# Altium footprint library Package_DFN_QFN.PcbLib: 735 footprints (part 31 of 46)
Each footprint in its own frame and in the unit in brackets; x right, y up, seen from the top. Pads: shape width x height; smd on the part's side, far side on the other; paste and mask are expansions set on the pad; w line width, h text height; cw(c..) or ccw(c..) is an arc to the next point about the centre after c.
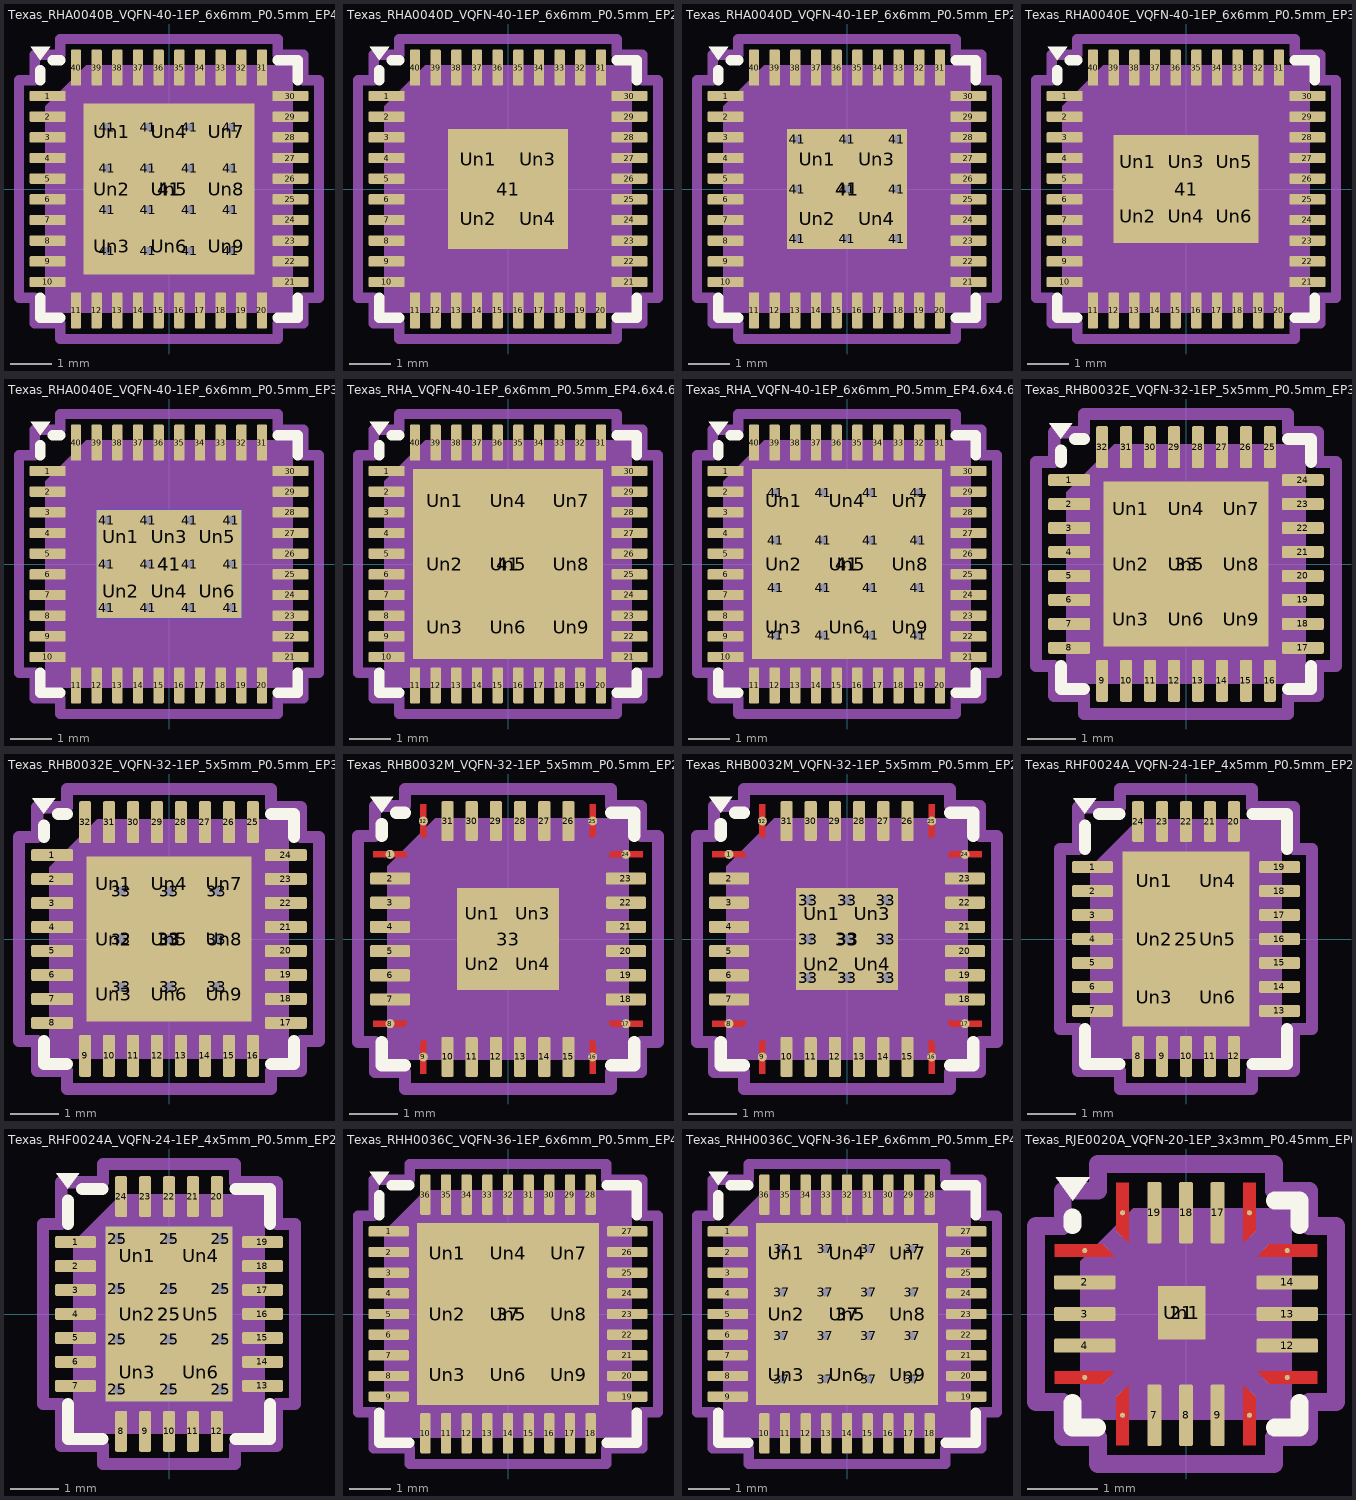
[diagram p30: the footprints below, top view; thin cyan lines are the x and y axes]

## Texas_RHA0040B_VQFN-40-1EP_6x6mm_P0.5mm_EP4.15x4.15mm_ThermalVias [mm] "Texas_RHA0040B_VQFN-40-1EP_6x6mm_P0.5mm_EP4.15x4.15mm_ThermalVias"
pads (67):
  rrect25% 0.875x0.25 smd: 1(-2.937,2.25) 2(-2.937,1.75) 3(-2.937,1.25) 4(-2.937,0.75) 5(-2.937,0.25) 6(-2.937,-0.25) 7(-2.937,-0.75) 8(-2.937,-1.25) 9(-2.937,-1.75) 10(-2.937,-2.25) 21(2.937,-2.25) 22(2.937,-1.75) 23(2.937,-1.25) 24(2.937,-0.75) 25(2.937,-0.25) 26(2.937,0.25) 27(2.937,0.75) 28(2.937,1.25) 29(2.937,1.75) 30(2.937,2.25)
  rrect25% 0.25x0.875 smd: 11(-2.25,-2.937) 12(-1.75,-2.937) 13(-1.25,-2.937) 14(-0.75,-2.937) 15(-0.25,-2.937) 16(0.25,-2.937) 17(0.75,-2.937) 18(1.25,-2.937) 19(1.75,-2.937) 20(2.25,-2.937) 31(2.25,2.937) 32(1.75,2.937) 33(1.25,2.937) 34(0.75,2.937) 35(0.25,2.937) 36(-0.25,2.937) 37(-0.75,2.937) 38(-1.25,2.937) 39(-1.75,2.937) 40(-2.25,2.937)
  round 0.5 hole 0.2: 41(-1.5,-1.5) 41(-1.5,-0.5) 41(-1.5,0.5) 41(-1.5,1.5) 41(-0.5,-1.5) 41(-0.5,-0.5) 41(-0.5,0.5) 41(-0.5,1.5) 41(0.5,-1.5) 41(0.5,-0.5) 41(0.5,0.5) 41(0.5,1.5) 41(1.5,-1.5) 41(1.5,-0.5) 41(1.5,0.5) 41(1.5,1.5)
  rect 4.15x4.15 smd: 41(0,0)
  rect 3.5x3.5 smd far side: 41(0,0)
  rrect22% 1.12x1.12 on Top Paste: Un1(-1.38,1.38) Un2(-1.38,0) Un3(-1.38,-1.38) Un4(0,1.38) Un5(0,0) Un6(0,-1.38) Un7(1.38,1.38) Un8(1.38,0) Un9(1.38,-1.38)
F.SilkS:
  region: -3.11,3.11 -3.35,3.44 -2.87,3.44
  lines w0.254: -3.11,-2.635 -3.11,-3.11 -2.635,-3.11 ; -3.11,2.635 -3.11,2.87 ; -2.81,3.11 -2.635,3.11 ; 2.635,-3.11 3.11,-3.11 3.11,-2.635 ; 2.635,3.11 3.11,3.11 3.11,2.635
Top Component Center:
  lines w0.127: -0.127,0 0.127,0 -0.127,0 ; 0,-0.127 0,0.127 0,-0.127
Top Assembly:
  region: 3,-3 -3,-3 -3,2 -2,3 3,3
Top Courtyard:
  lines w0.254: -3.63,-2.63 -3.25,-2.63 -3.25,-3.25 -2.63,-3.25 -2.63,-3.63 2.63,-3.63 2.63,-3.25 3.25,-3.25 3.25,-2.63 3.63,-2.63 3.63,2.63 3.25,2.63 3.25,3.25 2.63,3.25 2.63,3.63 -2.63,3.63 -2.63,3.25 -3.25,3.25 -3.25,2.63 -3.63,2.63 -3.63,-2.63
Top Designator:
  text ".Designator" at -3.43,-0.344 h1.52

## Texas_RHA0040D_VQFN-40-1EP_6x6mm_P0.5mm_EP2.9x2.9mm [mm] "Texas_RHA0040D_VQFN-40-1EP_6x6mm_P0.5mm_EP2.9x2.9mm"
pads (45):
  rrect25% 0.875x0.25 smd: 1(-2.937,2.25) 2(-2.937,1.75) 3(-2.937,1.25) 4(-2.937,0.75) 5(-2.937,0.25) 6(-2.937,-0.25) 7(-2.937,-0.75) 8(-2.937,-1.25) 9(-2.937,-1.75) 10(-2.937,-2.25) 21(2.937,-2.25) 22(2.937,-1.75) 23(2.937,-1.25) 24(2.937,-0.75) 25(2.937,-0.25) 26(2.937,0.25) 27(2.937,0.75) 28(2.937,1.25) 29(2.937,1.75) 30(2.937,2.25)
  rrect25% 0.25x0.875 smd: 11(-2.25,-2.937) 12(-1.75,-2.937) 13(-1.25,-2.937) 14(-0.75,-2.937) 15(-0.25,-2.937) 16(0.25,-2.937) 17(0.75,-2.937) 18(1.25,-2.937) 19(1.75,-2.937) 20(2.25,-2.937) 31(2.25,2.937) 32(1.75,2.937) 33(1.25,2.937) 34(0.75,2.937) 35(0.25,2.937) 36(-0.25,2.937) 37(-0.75,2.937) 38(-1.25,2.937) 39(-1.75,2.937) 40(-2.25,2.937)
  rect 2.9x2.9 smd: 41(0,0)
  rrect21% 1.17x1.17 on Top Paste: Un1(-0.725,0.725) Un2(-0.725,-0.725) Un3(0.725,0.725) Un4(0.725,-0.725)
F.SilkS:
  region: -3.11,3.11 -3.35,3.44 -2.87,3.44
  lines w0.254: -3.11,-2.635 -3.11,-3.11 -2.635,-3.11 ; -3.11,2.635 -3.11,2.87 ; -2.81,3.11 -2.635,3.11 ; 2.635,-3.11 3.11,-3.11 3.11,-2.635 ; 2.635,3.11 3.11,3.11 3.11,2.635
Top Component Center:
  lines w0.127: -0.127,0 0.127,0 -0.127,0 ; 0,-0.127 0,0.127 0,-0.127
Top Assembly:
  region: 3,-3 -3,-3 -3,2 -2,3 3,3
Top Courtyard:
  lines w0.254: -3.63,-2.63 -3.25,-2.63 -3.25,-3.25 -2.63,-3.25 -2.63,-3.63 2.63,-3.63 2.63,-3.25 3.25,-3.25 3.25,-2.63 3.63,-2.63 3.63,2.63 3.25,2.63 3.25,3.25 2.63,3.25 2.63,3.63 -2.63,3.63 -2.63,3.25 -3.25,3.25 -3.25,2.63 -3.63,2.63 -3.63,-2.63
Top Designator:
  text ".Designator" at -3.43,-0.344 h1.52

## Texas_RHA0040D_VQFN-40-1EP_6x6mm_P0.5mm_EP2.9x2.9mm_ThermalVias [mm] "Texas_RHA0040D_VQFN-40-1EP_6x6mm_P0.5mm_EP2.9x2.9mm_ThermalVias"
pads (55):
  rrect25% 0.875x0.25 smd: 1(-2.937,2.25) 2(-2.937,1.75) 3(-2.937,1.25) 4(-2.937,0.75) 5(-2.937,0.25) 6(-2.937,-0.25) 7(-2.937,-0.75) 8(-2.937,-1.25) 9(-2.937,-1.75) 10(-2.937,-2.25) 21(2.937,-2.25) 22(2.937,-1.75) 23(2.937,-1.25) 24(2.937,-0.75) 25(2.937,-0.25) 26(2.937,0.25) 27(2.937,0.75) 28(2.937,1.25) 29(2.937,1.75) 30(2.937,2.25)
  rrect25% 0.25x0.875 smd: 11(-2.25,-2.937) 12(-1.75,-2.937) 13(-1.25,-2.937) 14(-0.75,-2.937) 15(-0.25,-2.937) 16(0.25,-2.937) 17(0.75,-2.937) 18(1.25,-2.937) 19(1.75,-2.937) 20(2.25,-2.937) 31(2.25,2.937) 32(1.75,2.937) 33(1.25,2.937) 34(0.75,2.937) 35(0.25,2.937) 36(-0.25,2.937) 37(-0.75,2.937) 38(-1.25,2.937) 39(-1.75,2.937) 40(-2.25,2.937)
  round 0.5 hole 0.2: 41(-1.2,-1.2) 41(-1.2,0) 41(-1.2,1.2) 41(0,-1.2) 41(0,0) 41(0,1.2) 41(1.2,-1.2) 41(1.2,0) 41(1.2,1.2)
  rect 2.9x2.9 smd: 41(0,0)
  rect 2.9x2.9 smd far side: 41(0,0)
  rrect21% 1.21x1.21 on Top Paste: Un1(-0.725,0.725) Un2(-0.725,-0.725) Un3(0.725,0.725) Un4(0.725,-0.725)
F.SilkS:
  region: -3.11,3.11 -3.35,3.44 -2.87,3.44
  lines w0.254: -3.11,-2.635 -3.11,-3.11 -2.635,-3.11 ; -3.11,2.635 -3.11,2.87 ; -2.81,3.11 -2.635,3.11 ; 2.635,-3.11 3.11,-3.11 3.11,-2.635 ; 2.635,3.11 3.11,3.11 3.11,2.635
Top Component Center:
  lines w0.127: -0.127,0 0.127,0 -0.127,0 ; 0,-0.127 0,0.127 0,-0.127
Top Assembly:
  region: 3,-3 -3,-3 -3,2 -2,3 3,3
Top Courtyard:
  lines w0.254: -3.63,-2.63 -3.25,-2.63 -3.25,-3.25 -2.63,-3.25 -2.63,-3.63 2.63,-3.63 2.63,-3.25 3.25,-3.25 3.25,-2.63 3.63,-2.63 3.63,2.63 3.25,2.63 3.25,3.25 2.63,3.25 2.63,3.63 -2.63,3.63 -2.63,3.25 -3.25,3.25 -3.25,2.63 -3.63,2.63 -3.63,-2.63
Top Designator:
  text ".Designator" at -3.43,-0.344 h1.52

## Texas_RHA0040E_VQFN-40-1EP_6x6mm_P0.5mm_EP3.52x2.62mm [mm] "Texas_RHA0040E_VQFN-40-1EP_6x6mm_P0.5mm_EP3.52x2.62mm"
pads (47):
  rrect25% 0.875x0.25 smd: 1(-2.937,2.25) 2(-2.937,1.75) 3(-2.937,1.25) 4(-2.937,0.75) 5(-2.937,0.25) 6(-2.937,-0.25) 7(-2.937,-0.75) 8(-2.937,-1.25) 9(-2.937,-1.75) 10(-2.937,-2.25) 21(2.937,-2.25) 22(2.937,-1.75) 23(2.937,-1.25) 24(2.937,-0.75) 25(2.937,-0.25) 26(2.937,0.25) 27(2.937,0.75) 28(2.937,1.25) 29(2.937,1.75) 30(2.937,2.25)
  rrect25% 0.25x0.875 smd: 11(-2.25,-2.937) 12(-1.75,-2.937) 13(-1.25,-2.937) 14(-0.75,-2.937) 15(-0.25,-2.937) 16(0.25,-2.937) 17(0.75,-2.937) 18(1.25,-2.937) 19(1.75,-2.937) 20(2.25,-2.937) 31(2.25,2.937) 32(1.75,2.937) 33(1.25,2.937) 34(0.75,2.937) 35(0.25,2.937) 36(-0.25,2.937) 37(-0.75,2.937) 38(-1.25,2.937) 39(-1.75,2.937) 40(-2.25,2.937)
  rect 3.52x2.62 smd: 41(0,0)
  rrect25% 0.95x1.06 on Top Paste: Un1(-1.17,0.655) Un2(-1.17,-0.655) Un3(0,0.655) Un4(0,-0.655) Un5(1.17,0.655) Un6(1.17,-0.655)
F.SilkS:
  region: -3.11,3.11 -3.35,3.44 -2.87,3.44
  lines w0.254: -3.11,-2.635 -3.11,-3.11 -2.635,-3.11 ; -3.11,2.635 -3.11,2.87 ; -2.81,3.11 -2.635,3.11 ; 2.635,-3.11 3.11,-3.11 3.11,-2.635 ; 2.635,3.11 3.11,3.11 3.11,2.635
Top Component Center:
  lines w0.127: -0.127,0 0.127,0 -0.127,0 ; 0,-0.127 0,0.127 0,-0.127
Top Assembly:
  region: 3,-3 -3,-3 -3,2 -2,3 3,3
Top Courtyard:
  lines w0.254: -3.63,-2.63 -3.25,-2.63 -3.25,-3.25 -2.63,-3.25 -2.63,-3.63 2.63,-3.63 2.63,-3.25 3.25,-3.25 3.25,-2.63 3.63,-2.63 3.63,2.63 3.25,2.63 3.25,3.25 2.63,3.25 2.63,3.63 -2.63,3.63 -2.63,3.25 -3.25,3.25 -3.25,2.63 -3.63,2.63 -3.63,-2.63
Top Designator:
  text ".Designator" at -3.43,-0.344 h1.52

## Texas_RHA0040E_VQFN-40-1EP_6x6mm_P0.5mm_EP3.52x2.62mm_ThermalVias [mm] "Texas_RHA0040E_VQFN-40-1EP_6x6mm_P0.5mm_EP3.52x2.62mm_ThermalVias"
pads (60):
  rrect25% 0.875x0.25 smd: 1(-2.937,2.25) 2(-2.937,1.75) 3(-2.937,1.25) 4(-2.937,0.75) 5(-2.937,0.25) 6(-2.937,-0.25) 7(-2.937,-0.75) 8(-2.937,-1.25) 9(-2.937,-1.75) 10(-2.937,-2.25) 21(2.937,-2.25) 22(2.937,-1.75) 23(2.937,-1.25) 24(2.937,-0.75) 25(2.937,-0.25) 26(2.937,0.25) 27(2.937,0.75) 28(2.937,1.25) 29(2.937,1.75) 30(2.937,2.25)
  rrect25% 0.25x0.875 smd: 11(-2.25,-2.937) 12(-1.75,-2.937) 13(-1.25,-2.937) 14(-0.75,-2.937) 15(-0.25,-2.937) 16(0.25,-2.937) 17(0.75,-2.937) 18(1.25,-2.937) 19(1.75,-2.937) 20(2.25,-2.937) 31(2.25,2.937) 32(1.75,2.937) 33(1.25,2.937) 34(0.75,2.937) 35(0.25,2.937) 36(-0.25,2.937) 37(-0.75,2.937) 38(-1.25,2.937) 39(-1.75,2.937) 40(-2.25,2.937)
  round 0.5 hole 0.2: 41(-1.51,-1.06) 41(-1.51,0) 41(-1.51,1.06) 41(-0.503,-1.06) 41(-0.503,0) 41(-0.503,1.06) 41(0.503,-1.06) 41(0.503,0) 41(0.503,1.06) 41(1.51,-1.06) 41(1.51,0) 41(1.51,1.06)
  rect 3.52x2.62 smd: 41(0,0)
  rect 3.52x2.62 smd far side: 41(0,0)
  rrect25% 0.98x1.1 on Top Paste: Un1(-1.17,0.655) Un2(-1.17,-0.655) Un3(0,0.655) Un4(0,-0.655) Un5(1.17,0.655) Un6(1.17,-0.655)
F.SilkS:
  region: -3.11,3.11 -3.35,3.44 -2.87,3.44
  lines w0.254: -3.11,-2.635 -3.11,-3.11 -2.635,-3.11 ; -3.11,2.635 -3.11,2.87 ; -2.81,3.11 -2.635,3.11 ; 2.635,-3.11 3.11,-3.11 3.11,-2.635 ; 2.635,3.11 3.11,3.11 3.11,2.635
Top Component Center:
  lines w0.127: -0.127,0 0.127,0 -0.127,0 ; 0,-0.127 0,0.127 0,-0.127
Top Assembly:
  region: 3,-3 -3,-3 -3,2 -2,3 3,3
Top Courtyard:
  lines w0.254: -3.63,-2.63 -3.25,-2.63 -3.25,-3.25 -2.63,-3.25 -2.63,-3.63 2.63,-3.63 2.63,-3.25 3.25,-3.25 3.25,-2.63 3.63,-2.63 3.63,2.63 3.25,2.63 3.25,3.25 2.63,3.25 2.63,3.63 -2.63,3.63 -2.63,3.25 -3.25,3.25 -3.25,2.63 -3.63,2.63 -3.63,-2.63
Top Designator:
  text ".Designator" at -3.43,-0.344 h1.52

## Texas_RHA_VQFN-40-1EP_6x6mm_P0.5mm_EP4.6x4.6mm [mm] "Texas_RHA_VQFN-40-1EP_6x6mm_P0.5mm_EP4.6x4.6mm"
pads (50):
  rrect25% 0.875x0.25 smd: 1(-2.937,2.25) 2(-2.937,1.75) 3(-2.937,1.25) 4(-2.937,0.75) 5(-2.937,0.25) 6(-2.937,-0.25) 7(-2.937,-0.75) 8(-2.937,-1.25) 9(-2.937,-1.75) 10(-2.937,-2.25) 21(2.937,-2.25) 22(2.937,-1.75) 23(2.937,-1.25) 24(2.937,-0.75) 25(2.937,-0.25) 26(2.937,0.25) 27(2.937,0.75) 28(2.937,1.25) 29(2.937,1.75) 30(2.937,2.25)
  rrect25% 0.25x0.875 smd: 11(-2.25,-2.937) 12(-1.75,-2.937) 13(-1.25,-2.937) 14(-0.75,-2.937) 15(-0.25,-2.937) 16(0.25,-2.937) 17(0.75,-2.937) 18(1.25,-2.937) 19(1.75,-2.937) 20(2.25,-2.937) 31(2.25,2.937) 32(1.75,2.937) 33(1.25,2.937) 34(0.75,2.937) 35(0.25,2.937) 36(-0.25,2.937) 37(-0.75,2.937) 38(-1.25,2.937) 39(-1.75,2.937) 40(-2.25,2.937)
  rect 4.6x4.6 smd: 41(0,0)
  rrect20% 1.24x1.24 on Top Paste: Un1(-1.53,1.53) Un2(-1.53,0) Un3(-1.53,-1.53) Un4(0,1.53) Un5(0,0) Un6(0,-1.53) Un7(1.53,1.53) Un8(1.53,0) Un9(1.53,-1.53)
F.SilkS:
  region: -3.11,3.11 -3.35,3.44 -2.87,3.44
  lines w0.254: -3.11,-2.635 -3.11,-3.11 -2.635,-3.11 ; -3.11,2.635 -3.11,2.87 ; -2.81,3.11 -2.635,3.11 ; 2.635,-3.11 3.11,-3.11 3.11,-2.635 ; 2.635,3.11 3.11,3.11 3.11,2.635
Top Component Center:
  lines w0.127: -0.127,0 0.127,0 -0.127,0 ; 0,-0.127 0,0.127 0,-0.127
Top Assembly:
  region: 3,-3 -3,-3 -3,2 -2,3 3,3
Top Courtyard:
  lines w0.254: -3.63,-2.63 -3.25,-2.63 -3.25,-3.25 -2.63,-3.25 -2.63,-3.63 2.63,-3.63 2.63,-3.25 3.25,-3.25 3.25,-2.63 3.63,-2.63 3.63,2.63 3.25,2.63 3.25,3.25 2.63,3.25 2.63,3.63 -2.63,3.63 -2.63,3.25 -3.25,3.25 -3.25,2.63 -3.63,2.63 -3.63,-2.63
Top Designator:
  text ".Designator" at -3.43,-0.344 h1.52

## Texas_RHA_VQFN-40-1EP_6x6mm_P0.5mm_EP4.6x4.6mm_ThermalVias [mm] "Texas_RHA_VQFN-40-1EP_6x6mm_P0.5mm_EP4.6x4.6mm_ThermalVias"
pads (67):
  rrect25% 0.875x0.25 smd: 1(-2.937,2.25) 2(-2.937,1.75) 3(-2.937,1.25) 4(-2.937,0.75) 5(-2.937,0.25) 6(-2.937,-0.25) 7(-2.937,-0.75) 8(-2.937,-1.25) 9(-2.937,-1.75) 10(-2.937,-2.25) 21(2.937,-2.25) 22(2.937,-1.75) 23(2.937,-1.25) 24(2.937,-0.75) 25(2.937,-0.25) 26(2.937,0.25) 27(2.937,0.75) 28(2.937,1.25) 29(2.937,1.75) 30(2.937,2.25)
  rrect25% 0.25x0.875 smd: 11(-2.25,-2.937) 12(-1.75,-2.937) 13(-1.25,-2.937) 14(-0.75,-2.937) 15(-0.25,-2.937) 16(0.25,-2.937) 17(0.75,-2.937) 18(1.25,-2.937) 19(1.75,-2.937) 20(2.25,-2.937) 31(2.25,2.937) 32(1.75,2.937) 33(1.25,2.937) 34(0.75,2.937) 35(0.25,2.937) 36(-0.25,2.937) 37(-0.75,2.937) 38(-1.25,2.937) 39(-1.75,2.937) 40(-2.25,2.937)
  round 0.5 hole 0.2: 41(-1.725,-1.725) 41(-1.725,-0.575) 41(-1.725,0.575) 41(-1.725,1.725) 41(-0.575,-1.725) 41(-0.575,-0.575) 41(-0.575,0.575) 41(-0.575,1.725) 41(0.575,-1.725) 41(0.575,-0.575) 41(0.575,0.575) 41(0.575,1.725) 41(1.725,-1.725) 41(1.725,-0.575) 41(1.725,0.575) 41(1.725,1.725)
  rect 4.6x4.6 smd: 41(0,0)
  rect 3.95x3.95 smd far side: 41(0,0)
  rrect20% 1.24x1.24 on Top Paste: Un1(-1.53,1.53) Un2(-1.53,0) Un3(-1.53,-1.53) Un4(0,1.53) Un5(0,0) Un6(0,-1.53) Un7(1.53,1.53) Un8(1.53,0) Un9(1.53,-1.53)
F.SilkS:
  region: -3.11,3.11 -3.35,3.44 -2.87,3.44
  lines w0.254: -3.11,-2.635 -3.11,-3.11 -2.635,-3.11 ; -3.11,2.635 -3.11,2.87 ; -2.81,3.11 -2.635,3.11 ; 2.635,-3.11 3.11,-3.11 3.11,-2.635 ; 2.635,3.11 3.11,3.11 3.11,2.635
Top Component Center:
  lines w0.127: -0.127,0 0.127,0 -0.127,0 ; 0,-0.127 0,0.127 0,-0.127
Top Assembly:
  region: 3,-3 -3,-3 -3,2 -2,3 3,3
Top Courtyard:
  lines w0.254: -3.63,-2.63 -3.25,-2.63 -3.25,-3.25 -2.63,-3.25 -2.63,-3.63 2.63,-3.63 2.63,-3.25 3.25,-3.25 3.25,-2.63 3.63,-2.63 3.63,2.63 3.25,2.63 3.25,3.25 2.63,3.25 2.63,3.63 -2.63,3.63 -2.63,3.25 -3.25,3.25 -3.25,2.63 -3.63,2.63 -3.63,-2.63
Top Designator:
  text ".Designator" at -3.43,-0.344 h1.52

## Texas_RHB0032E_VQFN-32-1EP_5x5mm_P0.5mm_EP3.45x3.45mm [mm] "Texas_RHB0032E_VQFN-32-1EP_5x5mm_P0.5mm_EP3.45x3.45mm"
pads (42):
  rrect25% 0.875x0.25 smd: 1(-2.438,1.75) 2(-2.438,1.25) 3(-2.438,0.75) 4(-2.438,0.25) 5(-2.438,-0.25) 6(-2.438,-0.75) 7(-2.438,-1.25) 8(-2.438,-1.75) 17(2.438,-1.75) 18(2.438,-1.25) 19(2.438,-0.75) 20(2.438,-0.25) 21(2.438,0.25) 22(2.438,0.75) 23(2.438,1.25) 24(2.438,1.75)
  rrect25% 0.25x0.875 smd: 9(-1.75,-2.438) 10(-1.25,-2.438) 11(-0.75,-2.438) 12(-0.25,-2.438) 13(0.25,-2.438) 14(0.75,-2.438) 15(1.25,-2.438) 16(1.75,-2.438) 25(1.75,2.438) 26(1.25,2.438) 27(0.75,2.438) 28(0.25,2.438) 29(-0.25,2.438) 30(-0.75,2.438) 31(-1.25,2.438) 32(-1.75,2.438)
  rect 3.45x3.45 smd: 33(0,0)
  rrect25% 0.93x0.93 on Top Paste: Un1(-1.15,1.15) Un2(-1.15,0) Un3(-1.15,-1.15) Un4(0,1.15) Un5(0,0) Un6(0,-1.15) Un7(1.15,1.15) Un8(1.15,0) Un9(1.15,-1.15)
F.SilkS:
  region: -2.61,2.61 -2.85,2.94 -2.37,2.94
  lines w0.254: -2.61,-2.135 -2.61,-2.61 -2.135,-2.61 ; -2.61,2.135 -2.61,2.37 ; -2.31,2.61 -2.135,2.61 ; 2.135,-2.61 2.61,-2.61 2.61,-2.135 ; 2.135,2.61 2.61,2.61 2.61,2.135
Top Component Center:
  lines w0.127: -0.127,0 0.127,0 -0.127,0 ; 0,-0.127 0,0.127 0,-0.127
Top Assembly:
  region: 2.5,-2.5 -2.5,-2.5 -2.5,1.5 -1.5,2.5 2.5,2.5
Top Courtyard:
  lines w0.254: -3.13,-2.13 -3.13,2.13 -2.75,2.13 -2.75,2.75 -2.13,2.75 -2.13,3.13 2.13,3.13 2.13,2.75 2.75,2.75 2.75,2.13 3.13,2.13 3.13,-2.13 2.75,-2.13 2.75,-2.75 2.13,-2.75 2.13,-3.13 -2.13,-3.13 -2.13,-2.75 -2.75,-2.75 -2.75,-2.13 -3.13,-2.13
Top Designator:
  text ".Designator" at -3.43,-0.344 h1.52
3D body "Texas_RHB0032E_VQFN-32-1EP_5x5mm_P0.5mm_EP3.45x3.45mm.step": height 0.8, standoff 0, extent -2.5,-2.5 2.5,2.5

## Texas_RHB0032E_VQFN-32-1EP_5x5mm_P0.5mm_EP3.45x3.45mm_ThermalVias [mm] "Texas_RHB0032E_VQFN-32-1EP_5x5mm_P0.5mm_EP3.45x3.45mm_ThermalVias"
pads (52):
  rrect25% 0.875x0.25 smd: 1(-2.438,1.75) 2(-2.438,1.25) 3(-2.438,0.75) 4(-2.438,0.25) 5(-2.438,-0.25) 6(-2.438,-0.75) 7(-2.438,-1.25) 8(-2.438,-1.75) 17(2.438,-1.75) 18(2.438,-1.25) 19(2.438,-0.75) 20(2.438,-0.25) 21(2.438,0.25) 22(2.438,0.75) 23(2.438,1.25) 24(2.438,1.75)
  rrect25% 0.25x0.875 smd: 9(-1.75,-2.438) 10(-1.25,-2.438) 11(-0.75,-2.438) 12(-0.25,-2.438) 13(0.25,-2.438) 14(0.75,-2.438) 15(1.25,-2.438) 16(1.75,-2.438) 25(1.75,2.438) 26(1.25,2.438) 27(0.75,2.438) 28(0.25,2.438) 29(-0.25,2.438) 30(-0.75,2.438) 31(-1.25,2.438) 32(-1.75,2.438)
  round 0.5 hole 0.2: 33(-1,-1) 33(-1,0) 33(-1,1) 33(0,-1) 33(0,0) 33(0,1) 33(1,-1) 33(1,0) 33(1,1)
  rect 3.45x3.45 smd: 33(0,0)
  rect 2.5x2.5 smd far side: 33(0,0)
  rrect25% 0.93x0.93 on Top Paste: Un1(-1.15,1.15) Un2(-1.15,0) Un3(-1.15,-1.15) Un4(0,1.15) Un5(0,0) Un6(0,-1.15) Un7(1.15,1.15) Un8(1.15,0) Un9(1.15,-1.15)
F.SilkS:
  region: -2.61,2.61 -2.85,2.94 -2.37,2.94
  lines w0.254: -2.61,-2.135 -2.61,-2.61 -2.135,-2.61 ; -2.61,2.135 -2.61,2.37 ; -2.31,2.61 -2.135,2.61 ; 2.135,-2.61 2.61,-2.61 2.61,-2.135 ; 2.135,2.61 2.61,2.61 2.61,2.135
Top Component Center:
  lines w0.127: -0.127,0 0.127,0 -0.127,0 ; 0,-0.127 0,0.127 0,-0.127
Top Assembly:
  region: 2.5,-2.5 -2.5,-2.5 -2.5,1.5 -1.5,2.5 2.5,2.5
Top Courtyard:
  lines w0.254: -3.13,-2.13 -3.13,2.13 -2.75,2.13 -2.75,2.75 -2.13,2.75 -2.13,3.13 2.13,3.13 2.13,2.75 2.75,2.75 2.75,2.13 3.13,2.13 3.13,-2.13 2.75,-2.13 2.75,-2.75 2.13,-2.75 2.13,-3.13 -2.13,-3.13 -2.13,-2.75 -2.75,-2.75 -2.75,-2.13 -3.13,-2.13
Top Designator:
  text ".Designator" at -3.43,-0.344 h1.52
3D body "Texas_RHB0032E_VQFN-32-1EP_5x5mm_P0.5mm_EP3.45x3.45mm.step": height 0.8, standoff 0, extent -2.5,-2.5 2.5,2.5

## Texas_RHB0032M_VQFN-32-1EP_5x5mm_P0.5mm_EP2.1x2.1mm [mm] "Texas_RHB0032M_VQFN-32-1EP_5x5mm_P0.5mm_EP2.1x2.1mm"
pads (37):
  round 0.186 smd: 1(-2.438,1.75) 8(-2.438,-1.75) 9(-1.75,-2.438) 16(1.75,-2.438) 17(2.438,-1.75) 24(2.438,1.75) 25(1.75,2.438) 32(-1.75,2.438)
  rrect25% 0.825x0.25 smd: 2(-2.438,1.25) 3(-2.438,0.75) 4(-2.438,0.25) 5(-2.438,-0.25) 6(-2.438,-0.75) 7(-2.438,-1.25) 18(2.438,-1.25) 19(2.438,-0.75) 20(2.438,-0.25) 21(2.438,0.25) 22(2.438,0.75) 23(2.438,1.25)
  rrect25% 0.25x0.825 smd: 10(-1.25,-2.438) 11(-0.75,-2.438) 12(-0.25,-2.438) 13(0.25,-2.438) 14(0.75,-2.438) 15(1.25,-2.438) 26(1.25,2.438) 27(0.75,2.438) 28(0.25,2.438) 29(-0.25,2.438) 30(-0.75,2.438) 31(-1.25,2.438)
  rect 2.1x2.1 smd: 33(0,0)
  rrect25% 0.85x0.85 on Top Paste: Un1(-0.525,0.525) Un2(-0.525,-0.525) Un3(0.525,0.525) Un4(0.525,-0.525)
F.Cu:
  region: -2.088,1.759 -2.088,1.687 -2.788,1.687 -2.788,1.812 -2.141,1.812
  region: -2.088,-1.759 -2.141,-1.812 -2.788,-1.812 -2.788,-1.687 -2.088,-1.687
  region: -1.687,-2.788 -1.812,-2.788 -1.812,-2.141 -1.759,-2.088 -1.687,-2.088
  region: 1.812,-2.141 1.812,-2.788 1.687,-2.788 1.687,-2.088 1.759,-2.088
  region: 2.788,-1.812 2.141,-1.812 2.088,-1.759 2.088,-1.687 2.788,-1.687
  region: 2.788,1.687 2.088,1.687 2.088,1.759 2.141,1.812 2.788,1.812
  region: 1.812,2.141 1.759,2.088 1.687,2.088 1.687,2.788 1.812,2.788
  region: -1.687,2.088 -1.759,2.088 -1.812,2.141 -1.812,2.788 -1.687,2.788
F.SilkS:
  region: -2.61,2.61 -2.85,2.94 -2.37,2.94
  lines w0.254: -2.61,-2.135 -2.61,-2.61 -2.135,-2.61 ; -2.61,2.135 -2.61,2.37 ; -2.31,2.61 -2.135,2.61 ; 2.135,-2.61 2.61,-2.61 2.61,-2.135 ; 2.135,2.61 2.61,2.61 2.61,2.135
F.Paste:
  region: -2.088,1.759 -2.088,1.687 -2.788,1.687 -2.788,1.812 -2.141,1.812
  region: -2.088,-1.759 -2.141,-1.812 -2.788,-1.812 -2.788,-1.687 -2.088,-1.687
  region: -1.687,-2.788 -1.812,-2.788 -1.812,-2.141 -1.759,-2.088 -1.687,-2.088
  region: 1.812,-2.141 1.812,-2.788 1.687,-2.788 1.687,-2.088 1.759,-2.088
  region: 2.788,-1.812 2.141,-1.812 2.088,-1.759 2.088,-1.687 2.788,-1.687
  region: 2.788,1.687 2.088,1.687 2.088,1.759 2.141,1.812 2.788,1.812
  region: 1.812,2.141 1.759,2.088 1.687,2.088 1.687,2.788 1.812,2.788
  region: -1.687,2.088 -1.759,2.088 -1.812,2.141 -1.812,2.788 -1.687,2.788
F.Mask:
  region: -2.088,1.759 -2.088,1.687 -2.788,1.687 -2.788,1.812 -2.141,1.812
  region: -2.088,-1.759 -2.141,-1.812 -2.788,-1.812 -2.788,-1.687 -2.088,-1.687
  region: -1.687,-2.788 -1.812,-2.788 -1.812,-2.141 -1.759,-2.088 -1.687,-2.088
  region: 1.812,-2.141 1.812,-2.788 1.687,-2.788 1.687,-2.088 1.759,-2.088
  region: 2.788,-1.812 2.141,-1.812 2.088,-1.759 2.088,-1.687 2.788,-1.687
  region: 2.788,1.687 2.088,1.687 2.088,1.759 2.141,1.812 2.788,1.812
  region: 1.812,2.141 1.759,2.088 1.687,2.088 1.687,2.788 1.812,2.788
  region: -1.687,2.088 -1.759,2.088 -1.812,2.141 -1.812,2.788 -1.687,2.788
Top Component Center:
  lines w0.127: -0.127,0 0.127,0 -0.127,0 ; 0,-0.127 0,0.127 0,-0.127
Top Assembly:
  region: 2.5,-2.5 -2.5,-2.5 -2.5,1.5 -1.5,2.5 2.5,2.5
Top Courtyard:
  lines w0.254: -3.1,-2.13 -3.1,2.13 -2.75,2.13 -2.75,2.75 -2.13,2.75 -2.13,3.1 2.13,3.1 2.13,2.75 2.75,2.75 2.75,2.13 3.1,2.13 3.1,-2.13 2.75,-2.13 2.75,-2.75 2.13,-2.75 2.13,-3.1 -2.13,-3.1 -2.13,-2.75 -2.75,-2.75 -2.75,-2.13 -3.1,-2.13
Top Designator:
  text ".Designator" at -3.43,-0.344 h1.52

## Texas_RHB0032M_VQFN-32-1EP_5x5mm_P0.5mm_EP2.1x2.1mm_ThermalVias [mm] "Texas_RHB0032M_VQFN-32-1EP_5x5mm_P0.5mm_EP2.1x2.1mm_ThermalVias"
pads (47):
  round 0.186 smd: 1(-2.438,1.75) 8(-2.438,-1.75) 9(-1.75,-2.438) 16(1.75,-2.438) 17(2.438,-1.75) 24(2.438,1.75) 25(1.75,2.438) 32(-1.75,2.438)
  rrect25% 0.825x0.25 smd: 2(-2.438,1.25) 3(-2.438,0.75) 4(-2.438,0.25) 5(-2.438,-0.25) 6(-2.438,-0.75) 7(-2.438,-1.25) 18(2.438,-1.25) 19(2.438,-0.75) 20(2.438,-0.25) 21(2.438,0.25) 22(2.438,0.75) 23(2.438,1.25)
  rrect25% 0.25x0.825 smd: 10(-1.25,-2.438) 11(-0.75,-2.438) 12(-0.25,-2.438) 13(0.25,-2.438) 14(0.75,-2.438) 15(1.25,-2.438) 26(1.25,2.438) 27(0.75,2.438) 28(0.25,2.438) 29(-0.25,2.438) 30(-0.75,2.438) 31(-1.25,2.438)
  round 0.5 hole 0.2: 33(-0.8,-0.8) 33(-0.8,0) 33(-0.8,0.8) 33(0,-0.8) 33(0,0) 33(0,0.8) 33(0.8,-0.8) 33(0.8,0) 33(0.8,0.8)
  rect 2.1x2.1 smd: 33(0,0)
  rect 2.1x2.1 smd far side: 33(0,0)
  rrect25% 0.94x0.94 on Top Paste: Un1(-0.525,0.525) Un2(-0.525,-0.525) Un3(0.525,0.525) Un4(0.525,-0.525)
F.Cu:
  region: -1.687,2.088 -1.759,2.088 -1.812,2.141 -1.812,2.788 -1.687,2.788
  region: 1.812,2.141 1.759,2.088 1.687,2.088 1.687,2.788 1.812,2.788
  region: 2.788,1.687 2.088,1.687 2.088,1.759 2.141,1.812 2.788,1.812
  region: 2.788,-1.812 2.141,-1.812 2.088,-1.759 2.088,-1.687 2.788,-1.687
  region: 1.812,-2.141 1.812,-2.788 1.687,-2.788 1.687,-2.088 1.759,-2.088
  region: -1.687,-2.788 -1.812,-2.788 -1.812,-2.141 -1.759,-2.088 -1.687,-2.088
  region: -2.088,-1.759 -2.141,-1.812 -2.788,-1.812 -2.788,-1.687 -2.088,-1.687
  region: -2.088,1.759 -2.088,1.687 -2.788,1.687 -2.788,1.812 -2.141,1.812
F.SilkS:
  region: -2.61,2.61 -2.85,2.94 -2.37,2.94
  lines w0.254: -2.61,-2.135 -2.61,-2.61 -2.135,-2.61 ; -2.61,2.135 -2.61,2.37 ; -2.31,2.61 -2.135,2.61 ; 2.135,-2.61 2.61,-2.61 2.61,-2.135 ; 2.135,2.61 2.61,2.61 2.61,2.135
F.Paste:
  region: -1.687,2.088 -1.759,2.088 -1.812,2.141 -1.812,2.788 -1.687,2.788
  region: 1.812,2.141 1.759,2.088 1.687,2.088 1.687,2.788 1.812,2.788
  region: 2.788,1.687 2.088,1.687 2.088,1.759 2.141,1.812 2.788,1.812
  region: 2.788,-1.812 2.141,-1.812 2.088,-1.759 2.088,-1.687 2.788,-1.687
  region: 1.812,-2.141 1.812,-2.788 1.687,-2.788 1.687,-2.088 1.759,-2.088
  region: -1.687,-2.788 -1.812,-2.788 -1.812,-2.141 -1.759,-2.088 -1.687,-2.088
  region: -2.088,-1.759 -2.141,-1.812 -2.788,-1.812 -2.788,-1.687 -2.088,-1.687
  region: -2.088,1.759 -2.088,1.687 -2.788,1.687 -2.788,1.812 -2.141,1.812
F.Mask:
  region: -1.687,2.088 -1.759,2.088 -1.812,2.141 -1.812,2.788 -1.687,2.788
  region: 1.812,2.141 1.759,2.088 1.687,2.088 1.687,2.788 1.812,2.788
  region: 2.788,1.687 2.088,1.687 2.088,1.759 2.141,1.812 2.788,1.812
  region: 2.788,-1.812 2.141,-1.812 2.088,-1.759 2.088,-1.687 2.788,-1.687
  region: 1.812,-2.141 1.812,-2.788 1.687,-2.788 1.687,-2.088 1.759,-2.088
  region: -1.687,-2.788 -1.812,-2.788 -1.812,-2.141 -1.759,-2.088 -1.687,-2.088
  region: -2.088,-1.759 -2.141,-1.812 -2.788,-1.812 -2.788,-1.687 -2.088,-1.687
  region: -2.088,1.759 -2.088,1.687 -2.788,1.687 -2.788,1.812 -2.141,1.812
Top Component Center:
  lines w0.127: -0.127,0 0.127,0 -0.127,0 ; 0,-0.127 0,0.127 0,-0.127
Top Assembly:
  region: 2.5,-2.5 -2.5,-2.5 -2.5,1.5 -1.5,2.5 2.5,2.5
Top Courtyard:
  lines w0.254: -3.1,-2.13 -2.75,-2.13 -2.75,-2.75 -2.13,-2.75 -2.13,-3.1 2.13,-3.1 2.13,-2.75 2.75,-2.75 2.75,-2.13 3.1,-2.13 3.1,2.13 2.75,2.13 2.75,2.75 2.13,2.75 2.13,3.1 -2.13,3.1 -2.13,2.75 -2.75,2.75 -2.75,2.13 -3.1,2.13 -3.1,-2.13
Top Designator:
  text ".Designator" at -3.43,-0.344 h1.52

## Texas_RHF0024A_VQFN-24-1EP_4x5mm_P0.5mm_EP2.65x3.65mm [mm] "Texas_RHF0024A_VQFN-24-1EP_4x5mm_P0.5mm_EP2.65x3.65mm"
pads (31):
  rrect25% 0.85x0.25 smd: 1(-1.95,1.5) 2(-1.95,1) 3(-1.95,0.5) 4(-1.95,0) 5(-1.95,-0.5) 6(-1.95,-1) 7(-1.95,-1.5) 13(1.95,-1.5) 14(1.95,-1) 15(1.95,-0.5) 16(1.95,0) 17(1.95,0.5) 18(1.95,1) 19(1.95,1.5)
  rrect25% 0.25x0.85 smd: 8(-1,-2.45) 9(-0.5,-2.45) 10(0,-2.45) 11(0.5,-2.45) 12(1,-2.45) 20(1,2.45) 21(0.5,2.45) 22(0,2.45) 23(-0.5,2.45) 24(-1,2.45)
  rect 2.65x3.65 smd: 25(0,0)
  rrect25% 1.07x0.98 on Top Paste: Un1(-0.66,1.22) Un2(-0.66,0) Un3(-0.66,-1.22) Un4(0.66,1.22) Un5(0.66,0) Un6(0.66,-1.22)
F.SilkS:
  region: -2.11,2.61 -2.35,2.94 -1.87,2.94
  lines w0.254: -2.11,-1.885 -2.11,-2.61 -1.385,-2.61 ; -2.11,1.885 -2.11,2.37 ; -1.81,2.61 -1.385,2.61 ; 1.385,-2.61 2.11,-2.61 2.11,-1.885 ; 1.385,2.61 2.11,2.61 2.11,1.885
Top Component Center:
  lines w0.127: -0.127,0 0.127,0 -0.127,0 ; 0,-0.127 0,0.127 0,-0.127
Top Assembly:
  region: 2,-2.5 -2,-2.5 -2,1.5 -1,2.5 2,2.5
Top Courtyard:
  lines w0.254: -2.63,-1.88 -2.25,-1.88 -2.25,-2.75 -1.38,-2.75 -1.38,-3.13 1.38,-3.13 1.38,-2.75 2.25,-2.75 2.25,-1.88 2.63,-1.88 2.63,1.88 2.25,1.88 2.25,2.75 1.38,2.75 1.38,3.13 -1.38,3.13 -1.38,2.75 -2.25,2.75 -2.25,1.88 -2.63,1.88 -2.63,-1.88
Top Designator:
  text ".Designator" at -3.43,-0.344 h1.52
3D body "Texas_RHF0024A_VQFN-24-1EP_4x5mm_P0.5mm_EP2.65x3.65mm.step": height 1, standoff 0, extent -2,-2.5 2,2.5

## Texas_RHF0024A_VQFN-24-1EP_4x5mm_P0.5mm_EP2.65x3.65mm_ThermalVias [mm] "Texas_RHF0024A_VQFN-24-1EP_4x5mm_P0.5mm_EP2.65x3.65mm_ThermalVias"
pads (44):
  rrect25% 0.85x0.25 smd: 1(-1.95,1.5) 2(-1.95,1) 3(-1.95,0.5) 4(-1.95,0) 5(-1.95,-0.5) 6(-1.95,-1) 7(-1.95,-1.5) 13(1.95,-1.5) 14(1.95,-1) 15(1.95,-0.5) 16(1.95,0) 17(1.95,0.5) 18(1.95,1) 19(1.95,1.5)
  rrect25% 0.25x0.85 smd: 8(-1,-2.45) 9(-0.5,-2.45) 10(0,-2.45) 11(0.5,-2.45) 12(1,-2.45) 20(1,2.45) 21(0.5,2.45) 22(0,2.45) 23(-0.5,2.45) 24(-1,2.45)
  round 0.5 hole 0.2: 25(-1.075,-1.575) 25(-1.075,-0.525) 25(-1.075,0.525) 25(-1.075,1.575) 25(0,-1.575) 25(0,-0.525) 25(0,0.525) 25(0,1.575) 25(1.075,-1.575) 25(1.075,-0.525) 25(1.075,0.525) 25(1.075,1.575)
  rect 2.65x3.65 smd: 25(0,0)
  rect 2.65x3.65 smd far side: 25(0,0)
  rrect24% 1.15x1.05 on Top Paste: Un1(-0.66,1.22) Un2(-0.66,0) Un3(-0.66,-1.22) Un4(0.66,1.22) Un5(0.66,0) Un6(0.66,-1.22)
F.SilkS:
  region: -2.11,2.61 -2.35,2.94 -1.87,2.94
  lines w0.254: -2.11,-1.885 -2.11,-2.61 -1.385,-2.61 ; -2.11,1.885 -2.11,2.37 ; -1.81,2.61 -1.385,2.61 ; 1.385,-2.61 2.11,-2.61 2.11,-1.885 ; 1.385,2.61 2.11,2.61 2.11,1.885
Top Component Center:
  lines w0.127: -0.127,0 0.127,0 -0.127,0 ; 0,-0.127 0,0.127 0,-0.127
Top Assembly:
  region: 2,-2.5 -2,-2.5 -2,1.5 -1,2.5 2,2.5
Top Courtyard:
  lines w0.254: -2.63,-1.88 -2.25,-1.88 -2.25,-2.75 -1.38,-2.75 -1.38,-3.13 1.38,-3.13 1.38,-2.75 2.25,-2.75 2.25,-1.88 2.63,-1.88 2.63,1.88 2.25,1.88 2.25,2.75 1.38,2.75 1.38,3.13 -1.38,3.13 -1.38,2.75 -2.25,2.75 -2.25,1.88 -2.63,1.88 -2.63,-1.88
Top Designator:
  text ".Designator" at -3.43,-0.344 h1.52
3D body "Texas_RHF0024A_VQFN-24-1EP_4x5mm_P0.5mm_EP2.65x3.65mm.step": height 1, standoff 0, extent -2,-2.5 2,2.5

## Texas_RHH0036C_VQFN-36-1EP_6x6mm_P0.5mm_EP4.4x4.4mm [mm] "Texas_RHH0036C_VQFN-36-1EP_6x6mm_P0.5mm_EP4.4x4.4mm"
pads (46):
  rrect25% 0.975x0.25 smd: 1(-2.887,2) 2(-2.887,1.5) 3(-2.887,1) 4(-2.887,0.5) 5(-2.887,0) 6(-2.887,-0.5) 7(-2.887,-1) 8(-2.887,-1.5) 9(-2.887,-2) 19(2.887,-2) 20(2.887,-1.5) 21(2.887,-1) 22(2.887,-0.5) 23(2.887,0) 24(2.887,0.5) 25(2.887,1) 26(2.887,1.5) 27(2.887,2)
  rrect25% 0.25x0.975 smd: 10(-2,-2.887) 11(-1.5,-2.887) 12(-1,-2.887) 13(-0.5,-2.887) 14(0,-2.887) 15(0.5,-2.887) 16(1,-2.887) 17(1.5,-2.887) 18(2,-2.887) 28(2,2.887) 29(1.5,2.887) 30(1,2.887) 31(0.5,2.887) 32(0,2.887) 33(-0.5,2.887) 34(-1,2.887) 35(-1.5,2.887) 36(-2,2.887)
  rect 4.4x4.4 smd: 37(0,0)
  rrect21% 1.18x1.18 on Top Paste: Un1(-1.47,1.47) Un2(-1.47,0) Un3(-1.47,-1.47) Un4(0,1.47) Un5(0,0) Un6(0,-1.47) Un7(1.47,1.47) Un8(1.47,0) Un9(1.47,-1.47)
F.SilkS:
  region: -3.11,3.11 -3.35,3.44 -2.87,3.44
  lines w0.254: -3.11,-2.385 -3.11,-3.11 -2.385,-3.11 ; -3.11,2.385 -3.11,2.87 ; -2.81,3.11 -2.385,3.11 ; 2.385,-3.11 3.11,-3.11 3.11,-2.385 ; 2.385,3.11 3.11,3.11 3.11,2.385
Top Component Center:
  lines w0.127: -0.127,0 0.127,0 -0.127,0 ; 0,-0.127 0,0.127 0,-0.127
Top Assembly:
  region: 3,-3 -3,-3 -3,2 -2,3 3,3
Top Courtyard:
  lines w0.254: -3.63,-2.38 -3.25,-2.38 -3.25,-3.25 -2.38,-3.25 -2.38,-3.63 2.38,-3.63 2.38,-3.25 3.25,-3.25 3.25,-2.38 3.63,-2.38 3.63,2.38 3.25,2.38 3.25,3.25 2.38,3.25 2.38,3.63 -2.38,3.63 -2.38,3.25 -3.25,3.25 -3.25,2.38 -3.63,2.38 -3.63,-2.38
Top Designator:
  text ".Designator" at -3.43,-0.344 h1.52
3D body "Texas_RHH0036C_VQFN-36-1EP_6x6mm_P0.5mm_EP4.4x4.4mm.step": height 0.8, standoff 0, extent -3,-3 3,3

## Texas_RHH0036C_VQFN-36-1EP_6x6mm_P0.5mm_EP4.4x4.4mm_ThermalVias [mm] "Texas_RHH0036C_VQFN-36-1EP_6x6mm_P0.5mm_EP4.4x4.4mm_ThermalVias"
pads (63):
  rrect25% 0.975x0.25 smd: 1(-2.887,2) 2(-2.887,1.5) 3(-2.887,1) 4(-2.887,0.5) 5(-2.887,0) 6(-2.887,-0.5) 7(-2.887,-1) 8(-2.887,-1.5) 9(-2.887,-2) 19(2.887,-2) 20(2.887,-1.5) 21(2.887,-1) 22(2.887,-0.5) 23(2.887,0) 24(2.887,0.5) 25(2.887,1) 26(2.887,1.5) 27(2.887,2)
  rrect25% 0.25x0.975 smd: 10(-2,-2.887) 11(-1.5,-2.887) 12(-1,-2.887) 13(-0.5,-2.887) 14(0,-2.887) 15(0.5,-2.887) 16(1,-2.887) 17(1.5,-2.887) 18(2,-2.887) 28(2,2.887) 29(1.5,2.887) 30(1,2.887) 31(0.5,2.887) 32(0,2.887) 33(-0.5,2.887) 34(-1,2.887) 35(-1.5,2.887) 36(-2,2.887)
  round 0.5 hole 0.2: 37(-1.575,-1.575) 37(-1.575,-0.525) 37(-1.575,0.525) 37(-1.575,1.575) 37(-0.525,-1.575) 37(-0.525,-0.525) 37(-0.525,0.525) 37(-0.525,1.575) 37(0.525,-1.575) 37(0.525,-0.525) 37(0.525,0.525) 37(0.525,1.575) 37(1.575,-1.575) 37(1.575,-0.525) 37(1.575,0.525) 37(1.575,1.575)
  rect 4.4x4.4 smd: 37(0,0)
  rect 3.65x3.65 smd far side: 37(0,0)
  rrect21% 1.18x1.18 on Top Paste: Un1(-1.47,1.47) Un2(-1.47,0) Un3(-1.47,-1.47) Un4(0,1.47) Un5(0,0) Un6(0,-1.47) Un7(1.47,1.47) Un8(1.47,0) Un9(1.47,-1.47)
F.SilkS:
  region: -3.11,3.11 -3.35,3.44 -2.87,3.44
  lines w0.254: -3.11,-2.385 -3.11,-3.11 -2.385,-3.11 ; -3.11,2.385 -3.11,2.87 ; -2.81,3.11 -2.385,3.11 ; 2.385,-3.11 3.11,-3.11 3.11,-2.385 ; 2.385,3.11 3.11,3.11 3.11,2.385
Top Component Center:
  lines w0.127: -0.127,0 0.127,0 -0.127,0 ; 0,-0.127 0,0.127 0,-0.127
Top Assembly:
  region: 3,-3 -3,-3 -3,2 -2,3 3,3
Top Courtyard:
  lines w0.254: -3.63,-2.38 -3.63,2.38 -3.25,2.38 -3.25,3.25 -2.38,3.25 -2.38,3.63 2.38,3.63 2.38,3.25 3.25,3.25 3.25,2.38 3.63,2.38 3.63,-2.38 3.25,-2.38 3.25,-3.25 2.38,-3.25 2.38,-3.63 -2.38,-3.63 -2.38,-3.25 -3.25,-3.25 -3.25,-2.38 -3.63,-2.38
Top Designator:
  text ".Designator" at -3.43,-0.344 h1.52
3D body "Texas_RHH0036C_VQFN-36-1EP_6x6mm_P0.5mm_EP4.4x4.4mm.step": height 0.8, standoff 0, extent -3,-3 3,3

## Texas_RJE0020A_VQFN-20-1EP_3x3mm_P0.45mm_EP0.675x0.76mm [mm] "Texas_RJE0020A_VQFN-20-1EP_3x3mm_P0.45mm_EP0.675x0.76mm"
pads (22):
  round 0.073 smd: 1(-1.438,0.9) 5(-1.438,-0.9) 6(-0.9,-1.438) 10(0.9,-1.438) 11(1.438,-0.9) 15(1.438,0.9) 16(0.9,1.438) 20(-0.9,1.438)
  rrect25% 0.875x0.2 smd: 2(-1.438,0.45) 3(-1.438,0) 4(-1.438,-0.45) 12(1.438,-0.45) 13(1.438,0) 14(1.438,0.45)
  rrect25% 0.2x0.875 smd: 7(-0.45,-1.438) 8(0,-1.438) 9(0.45,-1.438) 17(0.45,1.438) 18(0,1.438) 19(-0.45,1.438)
  rect 0.675x0.76 smd: 21(-0.06,0.018)
  rrect25% 0.64x0.72 on Top Paste: Un1(-0.06,0.018)
F.Cu:
  region: -1.01,0.816 -1.01,0.81 -1.865,0.81 -1.865,0.99 -1.184,0.99
  region: -1.01,-0.816 -1.184,-0.99 -1.865,-0.99 -1.865,-0.81 -1.01,-0.81
  region: -0.81,-1.865 -0.99,-1.865 -0.99,-1.184 -0.816,-1.01 -0.81,-1.01
  region: 0.99,-1.184 0.99,-1.865 0.81,-1.865 0.81,-1.01 0.816,-1.01
  region: 1.865,-0.99 1.184,-0.99 1.01,-0.816 1.01,-0.81 1.865,-0.81
  region: 1.865,0.81 1.01,0.81 1.01,0.816 1.184,0.99 1.865,0.99
  region: 0.99,1.184 0.816,1.01 0.81,1.01 0.81,1.865 0.99,1.865
  region: -0.81,1.01 -0.816,1.01 -0.99,1.184 -0.99,1.865 -0.81,1.865
F.SilkS:
  region: -1.61,1.61 -1.85,1.94 -1.37,1.94
  lines w0.254: -1.61,-1.26 -1.61,-1.61 -1.26,-1.61 ; -1.61,1.26 -1.61,1.37 ; 1.26,-1.61 1.61,-1.61 1.61,-1.26 ; 1.26,1.61 1.61,1.61 1.61,1.26
F.Paste:
  region: -1.01,0.816 -1.01,0.81 -1.865,0.81 -1.865,0.99 -1.184,0.99
  region: -1.01,-0.816 -1.184,-0.99 -1.865,-0.99 -1.865,-0.81 -1.01,-0.81
  region: -0.81,-1.865 -0.99,-1.865 -0.99,-1.184 -0.816,-1.01 -0.81,-1.01
  region: 0.99,-1.184 0.99,-1.865 0.81,-1.865 0.81,-1.01 0.816,-1.01
  region: 1.865,-0.99 1.184,-0.99 1.01,-0.816 1.01,-0.81 1.865,-0.81
  region: 1.865,0.81 1.01,0.81 1.01,0.816 1.184,0.99 1.865,0.99
  region: 0.99,1.184 0.816,1.01 0.81,1.01 0.81,1.865 0.99,1.865
  region: -0.81,1.01 -0.816,1.01 -0.99,1.184 -0.99,1.865 -0.81,1.865
F.Mask:
  region: -1.01,0.816 -1.01,0.81 -1.865,0.81 -1.865,0.99 -1.184,0.99
  region: -1.01,-0.816 -1.184,-0.99 -1.865,-0.99 -1.865,-0.81 -1.01,-0.81
  region: -0.81,-1.865 -0.99,-1.865 -0.99,-1.184 -0.816,-1.01 -0.81,-1.01
  region: 0.99,-1.184 0.99,-1.865 0.81,-1.865 0.81,-1.01 0.816,-1.01
  region: 1.865,-0.99 1.184,-0.99 1.01,-0.816 1.01,-0.81 1.865,-0.81
  region: 1.865,0.81 1.01,0.81 1.01,0.816 1.184,0.99 1.865,0.99
  region: 0.99,1.184 0.816,1.01 0.81,1.01 0.81,1.865 0.99,1.865
  region: -0.81,1.01 -0.816,1.01 -0.99,1.184 -0.99,1.865 -0.81,1.865
Top Component Center:
  lines w0.127: -0.127,0 0.127,0 -0.127,0 ; 0,-0.127 0,0.127 0,-0.127
Top Assembly:
  region: 1.5,-1.5 -1.5,-1.5 -1.5,0.75 -0.75,1.5 1.5,1.5
Top Courtyard:
  lines w0.254: -2.13,-1.25 -2.13,1.25 -1.75,1.25 -1.75,1.75 -1.25,1.75 -1.25,2.13 1.25,2.13 1.25,1.75 1.75,1.75 1.75,1.25 2.13,1.25 2.13,-1.25 1.75,-1.25 1.75,-1.75 1.25,-1.75 1.25,-2.13 -1.25,-2.13 -1.25,-1.75 -1.75,-1.75 -1.75,-1.25 -2.13,-1.25
Top Designator:
  text ".Designator" at -3.43,-0.344 h1.52